# Altium schematic symbol library LM51772RHAR.SchLib: 1 symbol
Pins are listed as number, name and electrical type; pins without a type are passive.

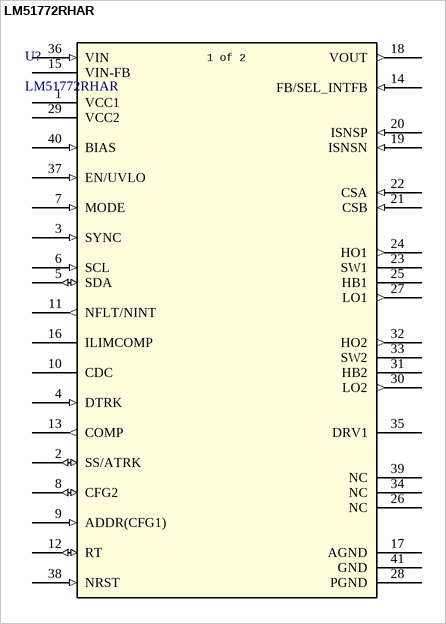
[diagram p0: symbol LM51772RHAR]

## LM51772RHAR
designator U?
55V wide VIN four-switch buck-boost controller with I2C interface 40-VQFN -40 to 125; Manufacturer_Name: Texas Instruments; Copyright: Copyright (C) 2025 Ultra Librarian. All rights reserved.; Manufacturer_Part_Number: LM51772RHAR; RefDes: RefDes; Type: Type
footprint VQFN40_6X6_3P3X3P3_TEX
pins: 1 VCC1 (power), 2 SS/ATRK (io), 3 SYNC (in), 4 DTRK (in), 5 SDA (io), 6 SCL (in), 7 MODE (in), 8 CFG2 (io), 9 ADDR(CFG1) (in), 10 CDC, 11 NFLT/NINT (out), 12 RT (io), 13 COMP (out), 14 FB/SEL_INTFB (in), 15 VIN-FB (power), 16 ILIMCOMP, 17 AGND (power), 18 VOUT (out), 19 ISNSN (in), 20 ISNSP (in), 21 CSB (in), 22 CSA (in), 23 SW1, 24 HO1 (out), 25 HB1, 26 NC, 27 LO1 (out), 28 PGND (power), 29 VCC2 (power), 30 LO2 (out), 31 HB2, 32 HO2 (out), 33 SW2, 34 NC, 35 DRV1, 36 VIN (in), 37 EN/UVLO (in), 38 NRST (in), 39 NC, 40 BIAS (in), 41 GND (power)
text: 1 of 2